# Altium footprint library TMDE_REV1.0.PcbLib: 94 footprints (part 3 of 6)
Each footprint in its own frame and in the unit in brackets; x right, y up, seen from the top. Pads: shape width x height; smd on the part's side, far side on the other; paste and mask are expansions set on the pad; w line width, h text height; cw(c..) or ccw(c..) is an arc to the next point about the centre after c.
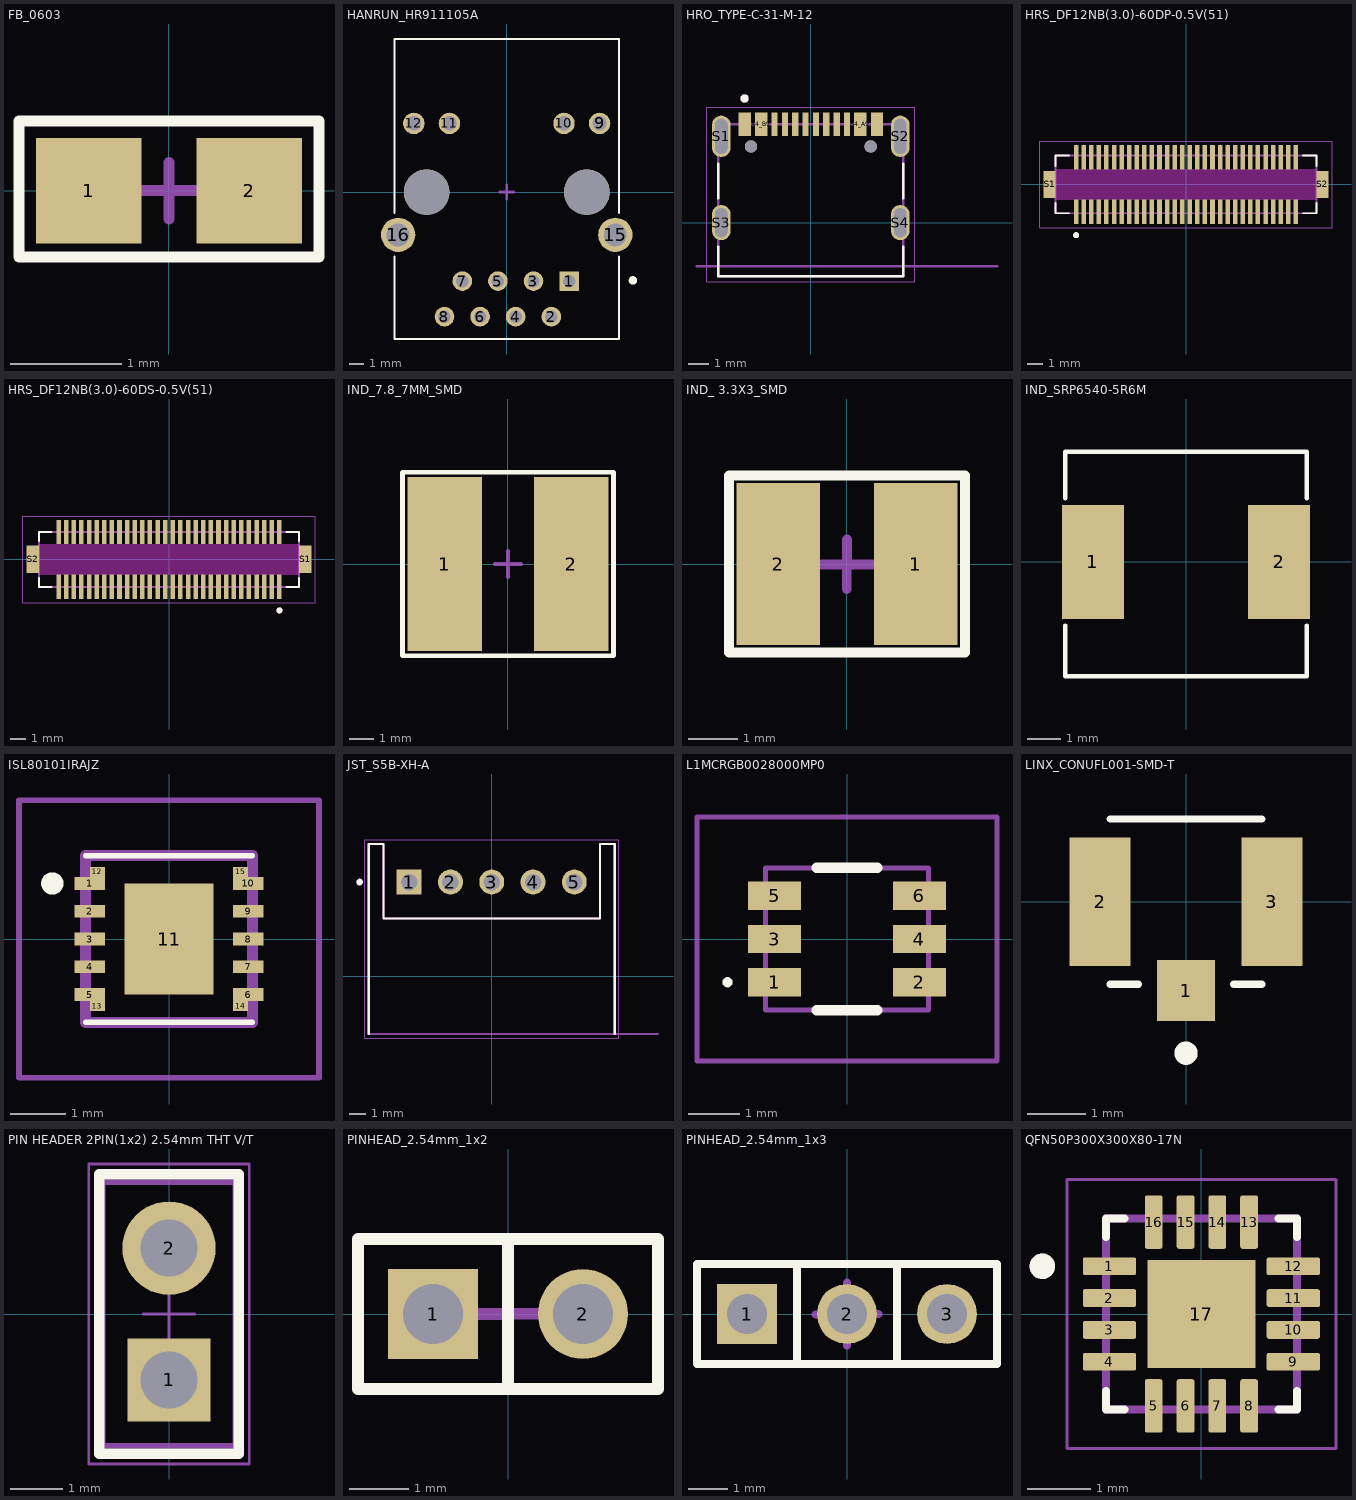
[diagram p2: the footprints below, top view; thin cyan lines are the x and y axes]

## FB_0603 [mm]
pads (2):
  rect 0.95x0.95 smd mask+0.102: 1(-0.725,0) 2(0.725,0)
Top Overlay:
  lines w0.1: -1.355,-0.601 1.355,-0.601 1.355,0.631 -1.355,0.631 -1.355,-0.601
Mechanical 16:
  lines w0.1: -0.254,0 0.254,0 ; 0,-0.254 0,0.254
3D body "BK1608TS431-T.STEP": height 0.95, standoff 0, extent -0.775,-0.394 0.825,0.406

## HANRUN_HR911105A [mm]
pads (16):
  rect 1.398x1.398 / inner round 1.398 / far side rect 1.398x1.398 hole 0.89: 1(4.45,-6.35)
  round 1.398 hole 0.89: 2(3.18,-8.89) 3(1.91,-6.35) 4(0.64,-8.89) 5(-0.63,-6.35) 6(-1.9,-8.89) 7(-3.17,-6.35) 8(-4.44,-8.89)
  round 1.53 hole 1.02: 9(6.625,4.9) 10(4.085,4.9) 11(-4.085,4.9) 12(-6.625,4.9)
  round 2.445 hole 1.63: 15(7.745,-3.05) 16(-7.745,-3.05)
  round 3.25 hole 3.25 unplated: ""(-5.715,0) ""(5.715,0)
Top Overlay:
  circle w0.3: c9,-6.3 r0.15
  lines w0.127: -8,-4.6 -8,-10.48 8,-10.48 8,-4.6 ; -8,-1.5 -8,10.92 8,10.92 8,-1.5
Mechanical 16:
  lines w0.2: -0.498,0.003 0.002,0.003 ; -0.001,-0.497 -0.001,0.003 ; 0,0.5 0,0 0.5,0
3D body "step_temp.STEP": height 13.5, standoff -3.05, extent -8.02,-10.525 8.02,10.775

## HRO_TYPE-C-31-M-12 [mm]
height 3.26
pads (18):
  rect 0.6x1.14 smd mask+0.05: A1_B12(-3.2,4.75) A4_B9(-2.4,4.75) B1_A12(3.2,4.75) B4_A9(2.4,4.75)
  rect 0.3x1.14 smd mask+0.05: A5(-1.25,4.75) A6(-0.25,4.75) A7(0.25,4.75) A8(1.25,4.75) B5(1.75,4.75) B6(0.75,4.75) B7(-0.75,4.75) B8(-1.75,4.75)
  oval 0.9x2 hole 0.6 slot 1.7 at 90 deg: S1(-4.325,4.17) S2(4.325,4.17)
  oval 0.9x1.7 hole 0.6 slot 1.4 at 90 deg: S3(-4.325,0) S4(4.325,0)
  round 0.6 hole 0.6 unplated: ""(-2.89,3.68) ""(2.89,3.68)
Top Overlay:
  circle w0.2: c-3.2,6 r0.1
  lines w0.127: -4.47,-1.17 -4.47,-2.6 4.47,-2.6 4.47,-1.17 ; -4.47,1.17 -4.47,2.85 ; 4.47,1.17 4.47,2.85
Mechanical 13:
  circle w0.2: c-3.2,6 r0.1
  lines w0.127: -5.5,-2.11 9,-2.11 ; -4.47,-2.6 4.47,-2.6 4.47,4.75 -4.47,4.75 -4.47,-2.6
  text "PCB EDGE" at 5.2,-1.9 h0.61
Mechanical 15:
  lines w0.05: -5.025,-2.85 -5.025,5.57 5.025,5.57 5.025,-2.85 -5.025,-2.85
3D body "step_temp.STEP": height 3.31, standoff -0.99, extent -4.47,-2.6 4.47,5.305

## HRS_DF12NB(3.0)-60DP-0.5V(51) [mm]
pads (62):
  rect 0.3x1.6 smd paste-2 mask+0.05: 1(-7.25,-1.8) 2(-7.25,1.8) 3(-6.75,-1.8) 4(-6.75,1.8) 5(-6.25,-1.8) 6(-6.25,1.8) 7(-5.75,-1.8) 8(-5.75,1.8) 9(-5.25,-1.8) 10(-5.25,1.8) 11(-4.75,-1.8) 12(-4.75,1.8) 13(-4.25,-1.8) 14(-4.25,1.8) 15(-3.75,-1.8) 16(-3.75,1.8) 17(-3.25,-1.8) 18(-3.25,1.8) 19(-2.75,-1.8) 20(-2.75,1.8) 21(-2.25,-1.8) 22(-2.25,1.8) 23(-1.75,-1.8) 24(-1.75,1.8) 25(-1.25,-1.8) 26(-1.25,1.8) 27(-0.75,-1.8) 28(-0.75,1.8) 29(-0.25,-1.8) 30(-0.25,1.8) 31(0.25,-1.8) 32(0.25,1.8) 33(0.75,-1.8) 34(0.75,1.8) 35(1.25,-1.8) 36(1.25,1.8) 37(1.75,-1.8) 38(1.75,1.8) 39(2.25,-1.8) 40(2.25,1.8) 41(2.75,-1.8) 42(2.75,1.8) 43(3.25,-1.8) 44(3.25,1.8) 45(3.75,-1.8) 46(3.75,1.8) 47(4.25,-1.8) 48(4.25,1.8) 49(4.75,-1.8) 50(4.75,1.8) 51(5.25,-1.8) 52(5.25,1.8) 53(5.75,-1.8) 54(5.75,1.8) 55(6.25,-1.8) 56(6.25,1.8) 57(6.75,-1.8) 58(6.75,1.8) 59(7.25,-1.8) 60(7.25,1.8)
  rect 0.8x1.8 smd paste+0 mask+0.102: S1(-9,0) S2(9,0)
Top Overlay:
  circle w0.2: c-7.25,-3.35 r0.1
  lines w0.127: -8.6,-1.22 -8.6,-1.9 -7.72,-1.9 ; -8.6,1.22 -8.6,1.9 -7.72,1.9 ; 7.72,-1.9 8.6,-1.9 8.6,-1.22 ; 7.72,1.9 8.6,1.9 8.6,1.22
Top Paste:
  drawing of 60 lines, arcs and shapes, not listed
Keep-Out Layer:
  region: 8.6,-1 -8.6,-1 -8.6,1 8.6,1
Mechanical 13:
  circle w0.2: c-7.25,-3.35 r0.1
  lines w0.127: -8.6,-1.9 -8.6,1.9 8.6,1.9 8.6,-1.9 -8.6,-1.9
Mechanical 15:
  lines w0.05: -9.65,-2.85 -9.65,2.85 9.65,2.85 9.65,-2.85 -9.65,-2.85
3D body "step_temp.STEP": height 4.2, standoff -0.4, extent -0.45,-2.3 17.65,0

## HRS_DF12NB(3.0)-60DS-0.5V(51) [mm]
pads (62):
  rect 0.3x1.6 smd paste-2 mask+0.05: 1(7.25,-1.8) 2(7.25,1.8) 3(6.75,-1.8) 4(6.75,1.8) 5(6.25,-1.8) 6(6.25,1.8) 7(5.75,-1.8) 8(5.75,1.8) 9(5.25,-1.8) 10(5.25,1.8) 11(4.75,-1.8) 12(4.75,1.8) 13(4.25,-1.8) 14(4.25,1.8) 15(3.75,-1.8) 16(3.75,1.8) 17(3.25,-1.8) 18(3.25,1.8) 19(2.75,-1.8) 20(2.75,1.8) 21(2.25,-1.8) 22(2.25,1.8) 23(1.75,-1.8) 24(1.75,1.8) 25(1.25,-1.8) 26(1.25,1.8) 27(0.75,-1.8) 28(0.75,1.8) 29(0.25,-1.8) 30(0.25,1.8) 31(-0.25,-1.8) 32(-0.25,1.8) 33(-0.75,-1.8) 34(-0.75,1.8) 35(-1.25,-1.8) 36(-1.25,1.8) 37(-1.75,-1.8) 38(-1.75,1.8) 39(-2.25,-1.8) 40(-2.25,1.8) 41(-2.75,-1.8) 42(-2.75,1.8) 43(-3.25,-1.8) 44(-3.25,1.8) 45(-3.75,-1.8) 46(-3.75,1.8) 47(-4.25,-1.8) 48(-4.25,1.8) 49(-4.75,-1.8) 50(-4.75,1.8) 51(-5.25,-1.8) 52(-5.25,1.8) 53(-5.75,-1.8) 54(-5.75,1.8) 55(-6.25,-1.8) 56(-6.25,1.8) 57(-6.75,-1.8) 58(-6.75,1.8) 59(-7.25,-1.8) 60(-7.25,1.8)
  rect 0.8x1.8 smd paste+0 mask+0.102: S1(8.95,0) S2(-8.95,0)
Top Overlay:
  circle w0.2: c7.25,-3.35 r0.1
  lines w0.127: -8.55,-1.22 -8.55,-1.8 -7.72,-1.8 ; -8.55,1.22 -8.55,1.8 -7.72,1.8 ; 7.72,-1.8 8.55,-1.8 8.55,-1.22 ; 7.72,1.8 8.55,1.8 8.55,1.22
Top Paste:
  drawing of 60 lines, arcs and shapes, not listed
Keep-Out Layer:
  region: 8.55,-1 -8.55,-1 -8.55,1 8.55,1
Mechanical 13:
  circle w0.2: c7.25,-3.35 r0.1
  lines w0.127: -8.55,-1.8 8.55,-1.8 8.55,1.8 -8.55,1.8 -8.55,-1.8
Mechanical 15:
  lines w0.05: -9.6,-2.85 9.6,-2.85 9.6,2.85 -9.6,2.85 -9.6,-2.85
3D body "step_temp.STEP": height 4.1, standoff -0.5, extent -0.5,-2.2 17.6,0

## IND_7.8_7MM_SMD [mm]
pads (2):
  rect 3x7 smd: 1(-2.55,0) 2(2.55,0)
Top Overlay:
  lines w0.2: -4.25,-3.7 4.25,-3.7 4.25,3.7 -4.15,3.7 -4.25,3.7 -4.25,-3.7
Mechanical 16:
  lines w0.15: -0.524,0 0,0 ; 0,-0.524 0,0 ; 0,0.524 0,0 ; 0.524,0 0,0
3D body "SDE0805A.STP": height 5, standoff 0, extent -3.776,-3.5 3.876,3.5

## IND_ 3.3X3_SMD [mm]
pads (2):
  rect 1.7x3.3 smd: 1(1.4,0) 2(-1.4,0)
Top Overlay:
  lines w0.2: -2.4,-1.8 2.4,-1.8 2.4,1.8 -2.4,1.8 -2.4,-1.8
Mechanical 16:
  lines w0.2: -0.506,-0.007 -0.006,-0.007 -0.006,-0.507 ; 0,0 0,0.5 ; 0.006,-0.011 0.506,-0.011
3D body "step_temp.STEP": height 1.2, standoff 0, extent -1.5,-1.6 1.5,1.4

## IND_SRP6540-5R6M [mm]
pads (2):
  rect 1.85x3.4 smd: 1(-2.775,0) 2(2.775,0)
Top Overlay:
  lines w0.127: -3.6,-1.9 -3.6,-3.416 3.6,-3.416 3.6,-1.9 ; -3.6,1.9 -3.6,3.289 3.6,3.289 3.6,1.9
3D body "SRR6040A.STP": height 3.71, standoff 0, extent -3.287,-3.373 3.313,3.227

## ISL80101IRAJZ [mm]
pads (15):
  rect 0.55x0.23 smd: 1(-1.425,1) 2(-1.425,0.5) 3(-1.425,0) 4(-1.425,-0.5) 5(-1.425,-1) 6(1.425,-1) 7(1.425,-0.5) 8(1.425,0) 9(1.425,0.5) 10(1.425,1)
  rect 1.6x2 smd: 11(0,0)
  rect 0.275x0.185 smd: 12(-1.288,1.207) 13(-1.288,-1.207) 14(1.288,-1.207) 15(1.288,1.207)
Top Overlay:
  lines w0.1: -1.5,-1.5 1.5,-1.5 ; -1.5,1.5 1.5,1.5
  lines w0.2: -2.1,0.9 ccw(c-2.1,1) -2.1,1.1 ccw(c-2.1,1) -2.1,0.9
Mechanical 13:
  lines w0.2: -1.5,-1.5 -1.5,1.5 1.5,1.5 1.5,-1.5 -1.5,-1.5
Mechanical 15:
  lines w0.1: -2.7,-2.5 -2.7,2.5 2.7,2.5 2.7,-2.5 -2.7,-2.5
3D body "ISL80113IRAJZ.stp": height 1, standoff 0, extent -1.505,-1.5 1.505,1.5

## JST_S5B-XH-A [mm]
height 6.1
pads (5):
  rect 1.508x1.508 / inner round 1.508 / far side rect 1.508x1.508 hole 1: 1(-5,5.7)
  round 1.508 hole 1: 2(-2.5,5.7) 3(0,5.7) 4(2.5,5.7) 5(5,5.7)
Top Overlay:
  circle w0.2: c-8,5.7 r0.1
  lines w0.127: -7.45,-3.5 -7.45,8 -6.55,8 -6.55,3.5 6.55,3.5 6.55,8 7.45,8 7.45,-3.5
Mechanical 13:
  circle w0.2: c-8,5.7 r0.1
  lines w0.127: 10.07,-3.5 7.45,-3.5 ; 7.45,-3.5 7.45,8 6.55,8 6.55,3.5 -6.55,3.5 -6.55,8 -7.45,8 -7.45,-3.5 7.45,-3.5
  text "PCB Edge" at 7.918,-3.203 h0.81
Mechanical 15:
  lines w0.05: -7.7,-3.75 7.7,-3.75 7.7,8.25 -7.7,8.25 -7.7,-3.75
3D body "step_temp.STEP": height 6.1, standoff -3.4, extent -7.45,-3.5 7.45,8

## L1MCRGB0028000MP0 [mm]
pads (6):
  rect 1.05x0.56 smd: 1(-1.425,-0.85) 2(1.425,-0.85) 3(-1.425,0) 4(1.425,0) 5(-1.425,0.85) 6(1.425,0.85)
Top Overlay:
  lines w0.1: -2.4,-0.85 cw(c-2.35,-0.85) -2.3,-0.85 cw(c-2.35,-0.85) -2.4,-0.85
  lines w0.2: -0.6,-1.4 0.6,-1.4 ; -0.6,1.4 0.6,1.4
Mechanical 13:
  lines w0.1: -1.6,-1.4 -1.6,1.4 1.6,1.4 1.6,-1.4 -1.6,-1.4
Mechanical 15:
  lines w0.1: -2.95,-2.4 -2.95,2.4 2.95,2.4 2.95,-2.4 -2.95,-2.4
3D body "L1MC-RGB0028000MP0.stp": height 1.85, standoff 0.05, extent -1.75,-1.4 1.75,1.4

## LINX_CONUFL001-SMD-T [mm]
pads (3):
  rect 1x1.05 smd: 1(0,-1.525)
  rect 1.05x2.2 smd: 2(-1.475,0) 3(1.475,0)
Top Overlay:
  circle w0.2: c0,-2.6 r0.1
  lines w0.127: -1.3,-1.42 -0.82,-1.42 ; -1.3,1.42 1.3,1.42 ; 0.82,-1.42 1.3,-1.42
3D body "step_temp.STEP": height 1.3, standoff 0, extent -1.5,-1.55 1.5,1.55

## PIN HEADER 2PIN(1x2) 2.54mm THT V/T [mm]
pads (2):
  rect 1.6x1.6 hole 1.1: 1(0,-1.27)
  round 1.8 hole 1.1: 2(0,1.27)
Top Overlay:
  lines w0.2: -1.345,-2.69 1.345,-2.69 1.345,2.69 -1.345,2.69 -1.345,-2.69
Mechanical 13:
  lines w0.1: -1.27,-2.54 1.27,-2.54 1.27,2.54 -1.27,2.54 -1.27,-2.54
Mechanical 15:
  lines w0.05: -0.5,0 0.5,0 ; 0,-0.5 0,0.5 ; -1.545,-2.89 1.545,-2.89 1.545,2.89 -1.545,2.89 -1.545,-2.89
3D body "61300211121.stp": height 8.57, standoff -2.97, extent -1.27,-2.54 1.27,2.54

## PINHEAD_2.54mm_1x2 [mil]
pads (2):
  rect 60x60 hole 40: 1(-50,0)
  round 60 hole 40: 2(50,0)
Top Overlay:
  lines w7.87: 0,-50 0,50 ; 0,-50 0,50 ; 0,-50 -100,-50 -100,50 0,50 ; 0,-50 100,-50 100,50 0,50
Mechanical 16:
  lines w7.87: -19.56,0 0.12,0 ; 0,-19.56 0,0.12 19.68,0.12 ; 0,0 0,19.68
3D body "User Library-HDR1X1 Rectangular Straight.step": height 339.58, standoff -124.98, extent -103.15,-53.15 3.15,53.15
3D body "User Library-HDR1X1 Rectangular Straight.step": height 339.58, standoff -124.98, extent -3.15,-53.14 103.15,53.15

## PINHEAD_2.54mm_1x3 [mil]
pads (3):
  rect 60x60 hole 40: 1(-100,0)
  round 60 hole 40: 2(0,0) 3(100,0)
Top Overlay:
  lines w7.87: -50,-50 -150,-50 -150,50 -50,50 ; -50,-50 -50,50 ; -50,-50 -50,50 ; -50,-50 50,-50 ; -50,50 50,50 ; 50,-50 150,-50 150,50 50,50 ; 50,-50 50,50 ; 50,-50 50,50
Mechanical 16:
  lines w7.87: -31.49,-0.47 0.01,-0.47 ; 0.01,-31.8 0.01,-0.3 ; 0.01,-0.13 31.51,-0.13 ; 0,0 0,31.5
3D body "User Library-HDR1X1 Rectangular Straight.step": height 339.58, standoff -124.98, extent 46.85,-53.15 153.15,53.15
3D body "User Library-HDR1X1 Rectangular Straight.step": height 339.58, standoff -124.98, extent -153.15,-53.15 -46.85,53.15
3D body "User Library-HDR1X1 Rectangular Straight.step": height 339.58, standoff -124.98, extent -53.15,-53.14 53.15,53.15

## QFN50P300X300X80-17N [mm]
height 0.8
pads (17):
  rrect25% 0.84x0.28 smd: 1(-1.445,0.75) 2(-1.445,0.25) 3(-1.445,-0.25) 4(-1.445,-0.75) 9(1.445,-0.75) 10(1.445,-0.25) 11(1.445,0.25) 12(1.445,0.75)
  rrect25% 0.28x0.84 smd: 5(-0.75,-1.445) 6(-0.25,-1.445) 7(0.25,-1.445) 8(0.75,-1.445) 13(0.75,1.445) 14(0.25,1.445) 15(-0.25,1.445) 16(-0.75,1.445)
  rect 1.7x1.7 smd paste-0.31: 17(0,0)
Top Overlay:
  circle w0.2: c-2.5,0.75 r0.1
  lines w0.127: -1.5,-1.21 -1.5,-1.5 -1.21,-1.5 ; -1.5,1.21 -1.5,1.5 -1.21,1.5 ; 1.21,-1.5 1.5,-1.5 1.5,-1.21 ; 1.21,1.5 1.5,1.5 1.5,1.21
Mechanical 13:
  circle w0.2: c-2.5,0.75 r0.1
  lines w0.127: -1.5,-1.5 -1.5,1.5 1.5,1.5 1.5,-1.5 -1.5,-1.5
Mechanical 15:
  lines w0.05: -2.115,-2.115 -2.115,2.115 2.115,2.115 2.115,-2.115 -2.115,-2.115
3D body "step_temp.STEP": height 0.8, standoff 0, extent -1.5,-1.5 1.5,1.5